# EAGLE library part HEADER-NRF (library madhu)
Header connector for NRF24L01 module
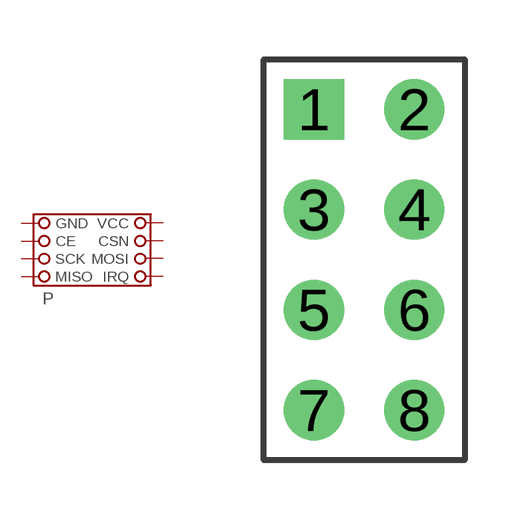
[diagram p19: symbol with the pads of HEADER-8; footprint HEADER-8]

Designator prefix P

## HEADER-NRF-PTH  [HEADER-8]
1  GND
2  VCC
3  CE
4  CSN
5  SCK
6  MOSI
7  MISO
8  IRQ

## Footprint HEADER-8 (pad centres in mm)
8 pin header grid 2.5 mm, outline 2.4 x 4.4 mm
drill 1.016 square: 1 -1.27,2.54
drill 1.016: 2 1.27,2.54; 3 -1.27,0; 4 1.27,0; 5 -1.27,-2.54; 6 1.27,-2.54; 7 -1.27,-5.08; 8 1.27,-5.08